# Altium footprint library PcbLib.PcbLib: 10 footprints
Each footprint in its own frame and in the unit in brackets; x right, y up, seen from the top. Pads: shape width x height; smd on the part's side, far side on the other; paste and mask are expansions set on the pad; w line width, h text height; cw(c..) or ccw(c..) is an arc to the next point about the centre after c.
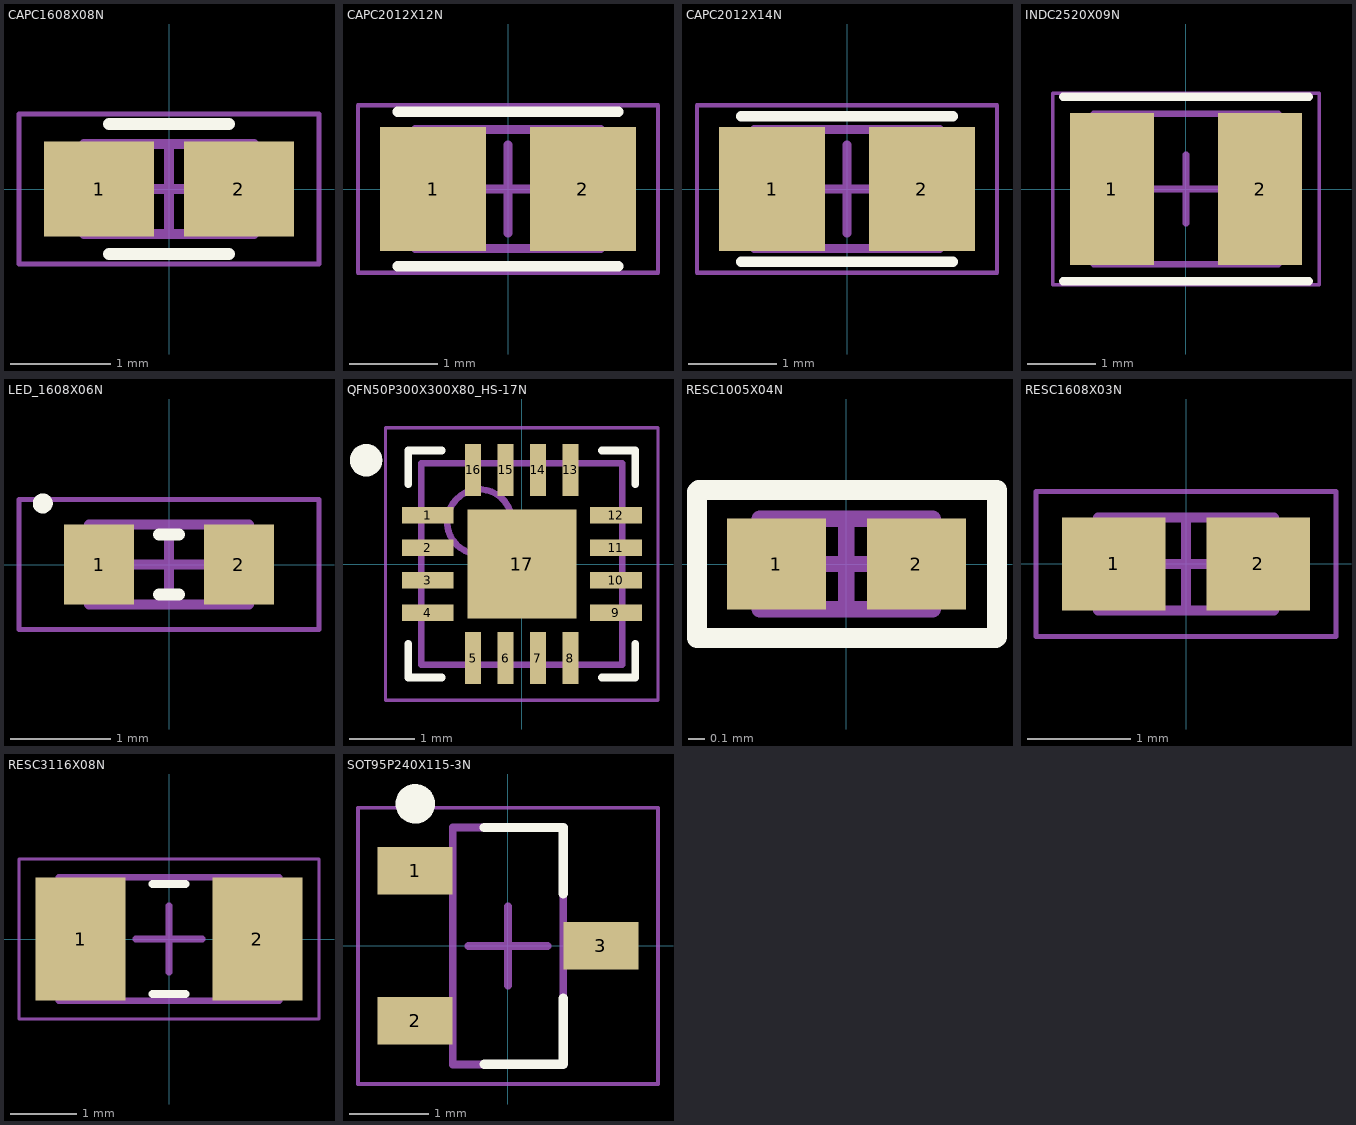
[diagram p0: the footprints below, top view; thin cyan lines are the x and y axes]

## CAPC1608X08N [mm] "Chip Capacitor, 2-Leads, Body 1.60x0.80mm, IPC Medium Density"
height 0.8
pads (2):
  rect 1.1x0.95 smd: 1(-0.7,0) 2(0.7,0)
Top Overlay:
  lines w0.12: -0.6,-0.65 0.6,-0.65 ; -0.6,0.65 0.6,0.65
Mechanical 7:
  lines w0.1: -0.85,-0.45 0.85,-0.45 0.85,0.45 -0.85,0.45 -0.85,-0.45
  text ".Designator" at -5.633,0.279 h1
Mechanical 15:
  lines w0.05: -1.5,-0.75 1.5,-0.75 1.5,0.75 -1.5,0.75 -1.5,-0.75
  lines w0.1: -0.45,0 0.45,0 ; 0,-0.45 0,0.45
3D body: height 0.8, standoff 0, extent 0.45,-0.45 0.85,0.45
3D body: height 0.8, standoff 0, extent -0.85,-0.45 -0.45,0.45
3D body: height 0.8, standoff 0, extent -0.45,-0.45 0.45,0.45

## CAPC2012X12N [mm] "Chip Capacitor, 2-Leads, Body 2.00x1.25mm, IPC Medium Density"
height 1.25
pads (2):
  rect 1.2x1.4 smd: 1(-0.85,0) 2(0.85,0)
Top Overlay:
  lines w0.12: -1.25,-0.875 1.25,-0.875 ; -1.25,0.875 1.25,0.875
Mechanical 7:
  lines w0.1: -1.05,-0.675 -1.05,0.675 1.05,0.675 1.05,-0.675 -1.05,-0.675
  text ".Designator" at -5.633,0.025 h1
Mechanical 15:
  lines w0.05: -1.7,-0.95 -1.7,0.95 1.7,0.95 1.7,-0.95 -1.7,-0.95
  lines w0.1: -0.5,0 0.5,0 ; 0,-0.5 0,0.5
3D body: height 1.25, standoff 0, extent -0.6,-0.675 0.6,0.675
3D body: height 1.25, standoff 0, extent -1.05,-0.675 -0.6,0.675
3D body: height 1.25, standoff 0, extent 0.6,-0.675 1.05,0.675

## CAPC2012X14N [mm] "Chip Capacitor, 2-Leads, Body 2.00x1.25mm, IPC Medium Density"
height 1.4
pads (2):
  rect 1.2x1.4 smd: 1(-0.85,0) 2(0.85,0)
Top Overlay:
  lines w0.12: -1.2,-0.825 1.2,-0.825 ; -1.2,0.825 1.2,0.825
Mechanical 7:
  lines w0.1: -1.05,-0.675 1.05,-0.675 1.05,0.675 -1.05,0.675 -1.05,-0.675
  text ".Designator" at -5.76,0.025 h1
Mechanical 15:
  lines w0.05: -1.7,-0.95 1.7,-0.95 1.7,0.95 -1.7,0.95 -1.7,-0.95
  lines w0.1: -0.5,0 0.5,0 ; 0,-0.5 0,0.5
3D body: height 1.4, standoff 0, extent 0.6,-0.675 1.05,0.675
3D body: height 1.4, standoff 0, extent -1.05,-0.675 -0.6,0.675
3D body: height 1.4, standoff 0, extent -0.6,-0.675 0.6,0.675

## INDC2520X09N [mm] "Chip Inductor, 2-Leads, Body 2.50x2.00mm, IPC Medium Density"
height 0.9
pads (2):
  rect 1.23x2.22 smd: 1(-1.085,0) 2(1.085,0)
Top Overlay:
  lines w0.12: -1.8,-1.35 1.8,-1.35 ; -1.8,1.35 1.8,1.35
Mechanical 7:
  lines w0.1: -1.35,-1.1 1.35,-1.1 1.35,1.1 -1.35,1.1 -1.35,-1.1
  text ".Designator" at -6.091,-0.305 h1
Mechanical 15:
  lines w0.05: -1.95,-1.4 1.95,-1.4 1.95,1.4 -1.95,1.4 -1.95,-1.4
  lines w0.1: -0.5,0 0.5,0 ; 0,-0.5 0,0.5
3D body: height 0.9, standoff 0, extent 0.75,-1.1 1.35,1.1
3D body: height 0.9, standoff 0, extent -1.35,-1.1 -0.75,1.1
3D body: height 0.9, standoff 0, extent -0.75,-1.1 0.75,1.1

## LED_1608X06N [mm] "Chip Diode, 2-Leads, Body 1.60x0.80mm, IPC Medium Density"
height 0.6
pads (2):
  rect 0.7x0.8 smd: 1(-0.7,0) 2(0.7,0)
Top Overlay:
  circle w0.1: c-1.262,0.612 r0.05
  lines w0.12: -0.1,-0.3 0.1,-0.3 ; -0.1,0.3 0.1,0.3
Mechanical 7:
  lines w0.1: -0.8,-0.4 0.8,-0.4 0.8,0.4 -0.8,0.4 -0.8,-0.4
  text ".Designator" at -5.456,0.559 h1
Mechanical 15:
  lines w0.05: -1.5,-0.65 1.5,-0.65 1.5,0.65 -1.5,0.65 -1.5,-0.65
  lines w0.1: -0.4,0 0.4,0 ; 0,-0.4 0,0.4
3D body "LED_0603_RED.STEP": height 0.6, standoff 0, extent -0.8,-0.4 0.8,0.4

## QFN50P300X300X80_HS-17N [mm] "QFN, 16-Leads, Body 3.00x3.00mm, Pitch 0.50mm, Thermal Pad 1.68x1.68mm, IPC Medium Density"
height 0.8
pads (17):
  rect 0.8x0.25 smd: 1(-1.45,0.75) 2(-1.45,0.25) 3(-1.45,-0.25) 4(-1.45,-0.75) 9(1.45,-0.75) 10(1.45,-0.25) 11(1.45,0.25) 12(1.45,0.75)
  rect 0.25x0.8 smd: 5(-0.75,-1.45) 6(-0.25,-1.45) 7(0.25,-1.45) 8(0.75,-1.45) 13(0.75,1.45) 14(0.25,1.45) 15(-0.25,1.45) 16(-0.75,1.45)
  rect 1.68x1.68 smd: 17(0,0)
Top Overlay:
  circle w0.25: c-2.4,1.6 r0.125
  lines w0.12: -1.75,-1.235 -1.75,-1.75 -1.235,-1.75 ; -1.75,1.235 -1.75,1.75 -1.235,1.75 ; 1.235,-1.75 1.75,-1.75 1.75,-1.235 ; 1.235,1.75 1.75,1.75 1.75,1.235
Mechanical 7:
  circle w0.1: c-0.65,0.65 r0.5
  lines w0.1: -1.55,-1.55 -1.55,1.55 1.55,1.55 1.55,-1.55 -1.55,-1.55
Mechanical 15:
  lines w0.05: -2.1,-2.1 -2.1,2.1 2.1,2.1 2.1,-2.1 -2.1,-2.1
  lines w0.1: -0.5,0 0.5,0 ; 0,-0.5 0,0.5
3D body: height 0.8, standoff 0.08, extent -1.55,-1.55 1.55,1.55

## RESC1005X04N [mm] "Chip Resistor, 2-Leads, Body 1.00x0.50mm, IPC Medium Density"
height 0.35
pads (2):
  rect 0.6x0.55 smd: 1(-0.425,0) 2(0.425,0)
Top Overlay:
  lines w0.12: -0.907,-0.45 -0.907,0.439 -0.896,0.45 -0.6,0.45 0.6,0.45 0.914,0.45 0.914,-0.443 0.907,-0.45 0.6,-0.45 -0.6,-0.45 -0.907,-0.45
Mechanical 7:
  lines w0.1: -0.525,-0.275 -0.525,0.275 0.525,0.275 0.525,-0.275 -0.525,-0.275
  text ".Designator" at -5.379,0.406 h1
Mechanical 15:
  lines w0.05: -0.9,-0.45 -0.9,0.45 0.9,0.45 0.9,-0.45 -0.9,-0.45
  lines w0.1: -0.275,0 0.275,0 ; 0,-0.275 0,0.275
3D body: height 0.35, standoff 0, extent -0.275,-0.275 0.275,0.275
3D body: height 0.35, standoff 0, extent -0.525,-0.275 -0.275,0.275
3D body: height 0.35, standoff 0, extent 0.275,-0.275 0.525,0.275

## RESC1608X03N [mm] "Chip Resistor, 2-Leads, Body 1.60x0.80mm, IPC Medium Density"
height 0.3
pads (2):
  rect 1x0.9 smd: 1(-0.7,0) 2(0.7,0)
Mechanical 7:
  lines w0.1: -0.85,-0.45 0.85,-0.45 0.85,0.45 -0.85,0.45 -0.85,-0.45
  text ".Designator" at -5.583,0.279 h1
Mechanical 15:
  lines w0.05: -1.45,-0.7 1.45,-0.7 1.45,0.7 -1.45,0.7 -1.45,-0.7
  lines w0.1: -0.45,0 0.45,0 ; 0,-0.45 0,0.45
3D body: height 0.3, standoff 0, extent 0.4,-0.45 0.85,0.45
3D body: height 0.3, standoff 0, extent -0.85,-0.45 -0.4,0.45
3D body: height 0.3, standoff 0, extent -0.4,-0.45 0.4,0.45

## RESC3116X08N [mm] "Chip Resistor, 2-Leads, Body 3.10x1.65mm, IPC Medium Density"
height 0.8
pads (2):
  rect 1.35x1.85 smd: 1(-1.325,0) 2(1.325,0)
Top Overlay:
  lines w0.12: -0.25,-0.825 0.25,-0.825 ; -0.25,0.825 0.25,0.825
Mechanical 7:
  lines w0.1: -1.65,-0.925 1.65,-0.925 1.65,0.925 -1.65,0.925 -1.65,-0.925
  text ".Designator" at -6.04,0.076 h1
Mechanical 15:
  lines w0.05: -2.25,-1.2 2.25,-1.2 2.25,1.2 -2.25,1.2 -2.25,-1.2
  lines w0.1: -0.5,0 0.5,0 ; 0,-0.5 0,0.5
3D body: height 0.8, standoff 0, extent 1.05,-0.925 1.65,0.925
3D body: height 0.8, standoff 0, extent -1.65,-0.925 -1.05,0.925
3D body: height 0.8, standoff 0, extent -1.05,-0.925 1.05,0.925

## SOT95P240X115-3N [mm] "SOT23, 3-Leads, Body 2.90x2.40mm, Pitch 0.95mm, IPC Medium Density"
height 1.15
pads (3):
  rect 0.95x0.6 smd: 1(-1.175,0.95) 2(-1.175,-0.95) 3(1.175,0)
Top Overlay:
  circle w0.25: c-1.175,1.8 r0.125
  lines w0.12: -0.3,-1.5 0.7,-1.5 0.7,-0.66 ; -0.3,1.5 0.7,1.5 0.7,0.66
Mechanical 7:
  lines w0.1: -0.7,-1.5 -0.7,1.5 0.7,1.5 0.7,-1.5 -0.7,-1.5
  text ".Designator" at -5.329,0.838 h1
Mechanical 15:
  lines w0.05: -1.9,-1.75 -1.9,1.75 1.9,1.75 1.9,-1.75 -1.9,-1.75
  lines w0.1: -0.5,0 0.5,0 ; 0,-0.5 0,0.5
3D body "2n7002.stp": height 0.96, standoff -0.04, extent -1.125,-1.45 1.175,1.45